# Altium integrated library Integrated_LibraryRS485-Wifi.IntLib: 3 symbols
Pins are listed as number, name and electrical type; pins without a type are passive.

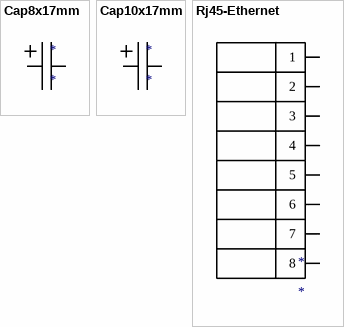
[diagram p0: symbols Cap8x17mm to Rj45-Ethernet]

## Cap8x17mm
designator *
footprint cap8x17mm
pins: 1, 2

## Cap10x17mm
designator *
footprint Cap10x17mm
pins: 1, 2

## Rj45-Ethernet
designator *
footprint Rj45_Ethernet
pins: 1, 2, 3, 4, 5, 6, 7, 8